# Altium footprint library FUSE_3557-15.PcbLib: 1 footprints
Each footprint in its own frame and in the unit in brackets; x right, y up, seen from the top. Pads: shape width x height; smd on the part's side, far side on the other; paste and mask are expansions set on the pad; w line width, h text height; cw(c..) or ccw(c..) is an arc to the next point about the centre after c.
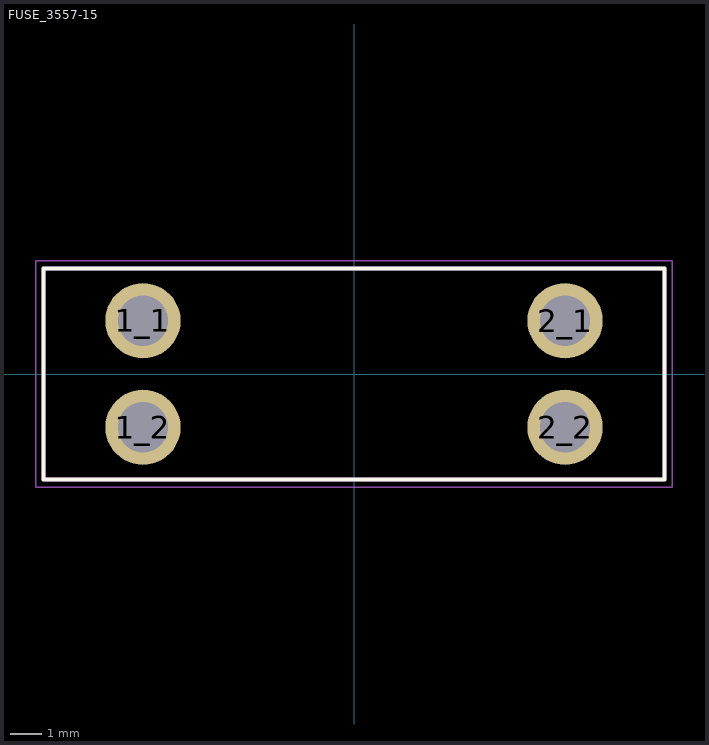
[diagram p0: the footprint, top view; thin cyan lines are the x and y axes]

## FUSE_3557-15 [mm]
height 7.37
pads (4):
  round 2.4 hole 1.6: 1_1(-6.735,1.7) 1_2(-6.735,-1.7) 2_1(6.735,1.7) 2_2(6.735,-1.7)
Top Overlay:
  lines w0.127: -9.905,-3.365 -9.905,3.365 9.905,3.365 9.905,-3.365 -9.905,-3.365
Assembly Top:
  lines w0.127: -9.905,-3.365 -9.905,3.365 9.905,3.365 9.905,-3.365 -9.905,-3.365
Courtyard Top:
  lines w0.05: -10.155,-3.615 10.155,-3.615 10.155,3.615 -10.155,3.615 -10.155,-3.615
3D body "step_temp.STEP": height 3.14, standoff -7.02, extent -9.498,-3.518 10.314,3.213